# EAGLE library part TPH1R403NL,L1Q (library TPH1R403NL_L1Q)
N-Channel 30 V 60A (Ta) 1.6W (Ta), 64W (Tc) Surface Mount 8-SOP Advance (5x5) Source: Datasheet <https://www.mouser.in/ProductDetail/Toshiba/TPH1R403NLL1Q?qs=HVbQlW5zcXWxPmEVdb2K1w==&srsltid=AfmBOoqRHMGlSDzUAlTxkWXR9G5-gdRWGcO8wnP1ZC8y2IEoxCRQZ0fW>
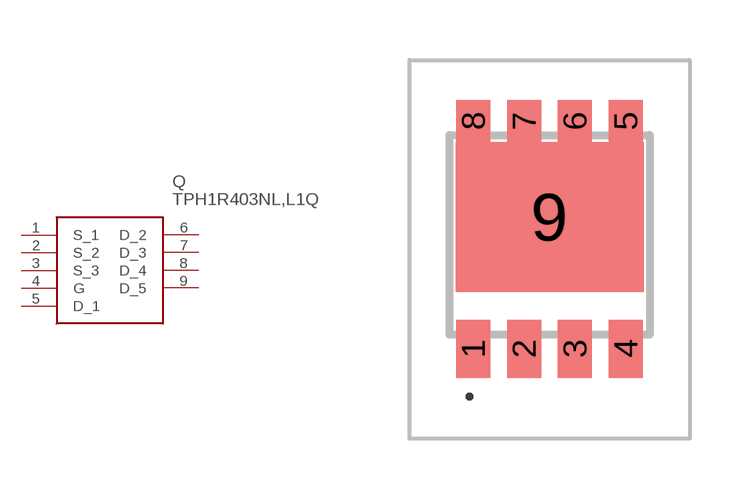
[diagram p0: symbol with the pads of TPH1R403NLL1Q; footprint TPH1R403NLL1Q]

Designator prefix Q

## TPH1R403NL,L1Q (Arrow_Part_Number: TPH1R403NL,L1Q; Arrow_Price-Stock: https://www.arrow.com/en/products/tph1r403nll1q/toshiba?utm_currency=USD&region=nac; Description: N-Channel 30 V 60A (Ta) 1.6W (Ta), 64W (Tc) Surface Mount 8-SOP Advance (5x5); Height: 1mm; Manufacturer_Name: Toshiba; Manufacturer_Part_Number: TPH1R403NL,L1Q; Mouser_Part_Number: 757-TPH1R403NLL1Q; Mouser_Price-Stock: https://www.mouser.co.uk/ProductDetail/Toshiba/TPH1R403NLL1Q?qs=HVbQlW5zcXWxPmEVdb2K1w%3D%3D)  [TPH1R403NLL1Q]
1  S_1
2  S_2
3  S_3
4  G
5  D_1
6  D_2
7  D_3
8  D_4
9  D_5

## Footprint TPH1R403NLL1Q (pad centres in mm)
TPH1R403NL,L1Q-1
smd 0.85 x 1.45: 1 -1.905,-2.85; 2 -0.635,-2.85; 3 0.635,-2.85; 4 1.905,-2.85
smd 0.85 x 1.05: 5 1.905,2.85; 6 0.635,2.85; 7 -0.635,2.85; 8 -1.905,2.85
smd 4.7 x 3.75: 9 0,0.45